# Altium footprint library DIO_1N4148WS_R9G.PcbLib: 1 footprints
Each footprint in its own frame and in the unit in brackets; x right, y up, seen from the top. Pads: shape width x height; smd on the part's side, far side on the other; paste and mask are expansions set on the pad; w line width, h text height; cw(c..) or ccw(c..) is an arc to the next point about the centre after c.
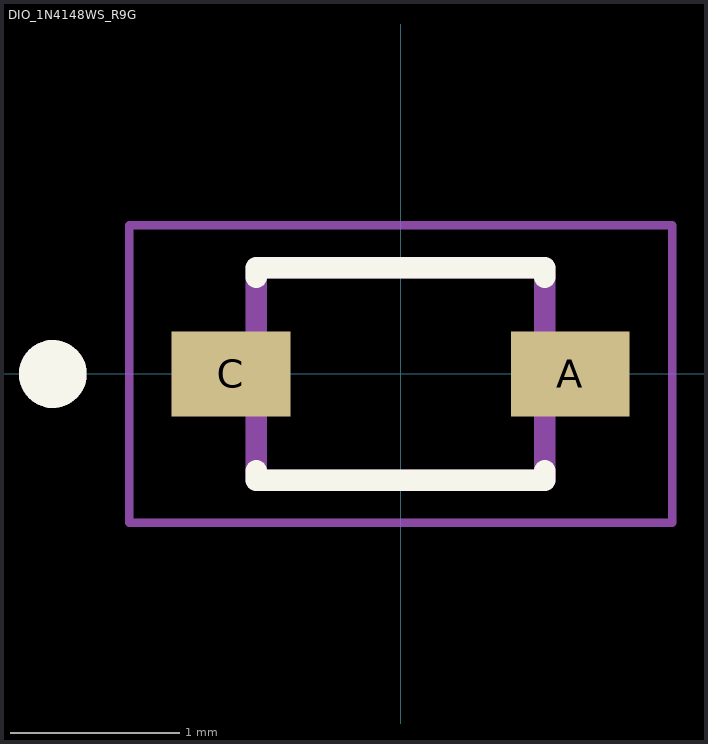
[diagram p0: the footprint, top view; thin cyan lines are the x and y axes]

## DIO_1N4148WS_R9G [mm]
height 1.1
pads (2):
  rect 0.7x0.5 smd: A(1,0) C(-1,0)
Top Overlay:
  circle w0.2: c-2.049,0 r0.1
  lines w0.127: -0.85,-0.57 -0.85,-0.625 0.85,-0.625 0.85,-0.57 ; -0.85,0.57 -0.85,0.625 0.85,0.625 0.85,0.57
Mechanical 13:
  circle w0.2: c-2.049,0 r0.1
  lines w0.127: -0.85,-0.625 -0.85,0.625 0.85,0.625 0.85,-0.625 -0.85,-0.625
Mechanical 15:
  lines w0.05: -1.6,-0.875 -1.6,0.875 1.6,0.875 1.6,-0.875 -1.6,-0.875
3D body "step_temp.STEP": height 1.1, standoff 0, extent -1.25,-0.625 1.25,0.625